# Altium footprint library Connectors.PcbLib: 228 footprints (part 6 of 15)
Each footprint in its own frame and in the unit in brackets; x right, y up, seen from the top. Pads: shape width x height; smd on the part's side, far side on the other; paste and mask are expansions set on the pad; w line width, h text height; cw(c..) or ccw(c..) is an arc to the next point about the centre after c.
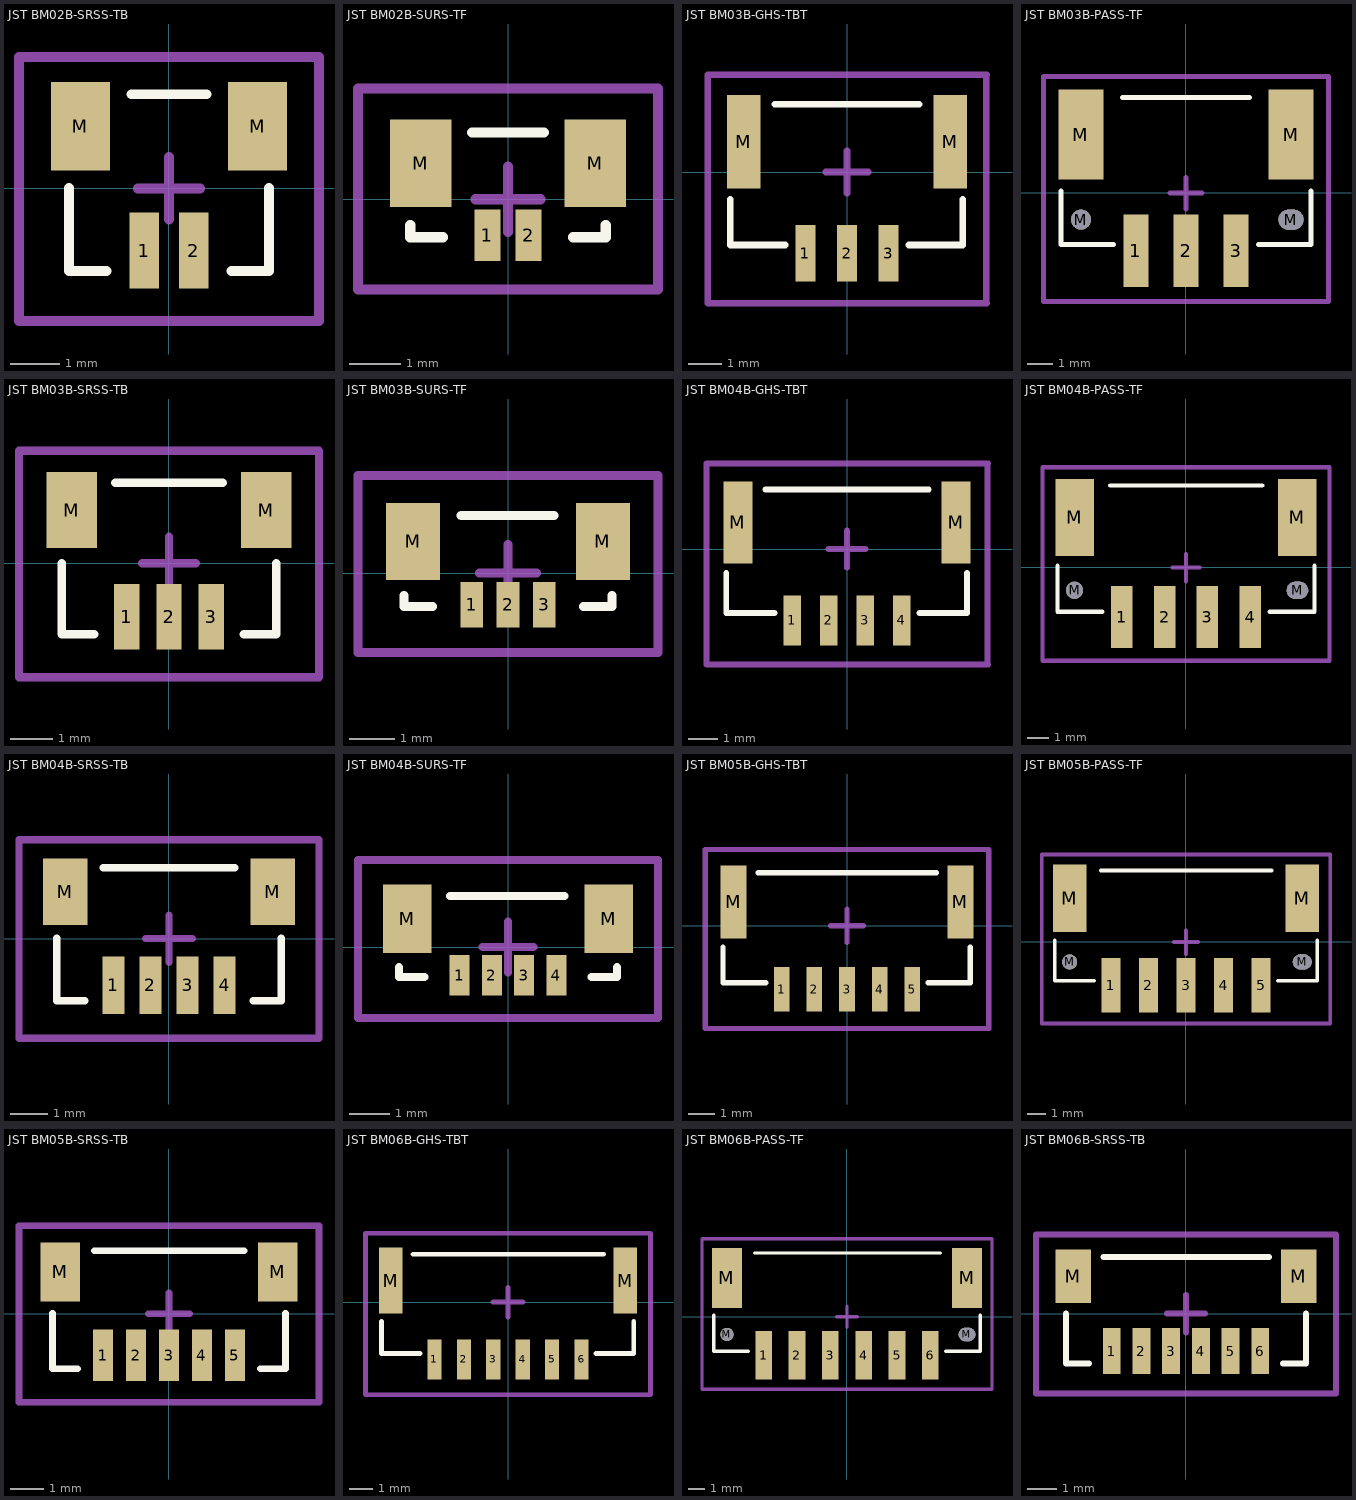
[diagram p5: the footprints below, top view; thin cyan lines are the x and y axes]

## JST BM02B-SRSS-TB [mm] "1.0mm pitch/Disconnectable Crimp style connector"
height 2.95
pads (4):
  rect 0.6x1.55 smd: 1(-0.5,-1.262) 2(0.5,-1.262)
  rect 1.2x1.8 smd: M(-1.8,1.262) M(1.8,1.262)
Top Overlay:
  lines w0.2: -2.032,0.008 -2.032,-1.676 -1.27,-1.676 ; -0.762,1.913 0.762,1.913 ; 1.27,-1.676 2.032,-1.676 2.032,0.008
Top Courtyard:
  lines w0.2: -0.635,0 0.635,0 ; 0,-0.635 0,0.635 ; -3.048,-2.692 -3.048,2.667 3.048,2.667 3.048,-2.692 -3.048,-2.692
3D body "JST BM02B-SRSS-TB.STEP": height 4.32, standoff 0, extent -2,-1.687 2,1.913

## JST BM02B-SURS-TF [mm] "1.0mm pitch/Disconnectable Crimp style connector"
height 3.95
pads (4):
  rect 0.5x1 smd: 1(-0.4,-0.7) 2(0.4,-0.7)
  rect 1.2x1.7 smd: M(-1.7,0.7) M(1.7,0.7)
Top Overlay:
  lines w0.2: -1.905,-0.5 -1.905,-0.741 -1.27,-0.741 ; -0.7,1.3 0.7,1.3 ; 1.27,-0.741 1.905,-0.741 1.905,-0.5
Top Courtyard:
  lines w0.2: -0.635,0 0.635,0 ; 0,-0.635 0,0.635 ; -2.921,-1.757 -2.921,2.159 2.921,2.159 2.921,-1.757 -2.921,-1.757
3D body "JST BM02B-SURS-TF.STEP": height 2.75, standoff 0, extent -1.9,-0.995 1.9,1.255

## JST BM03B-GHS-TBT [mm] "JST GH Series 1.25mm pitch, 4 pin top entry connector"
height 4.5
pads (5):
  rect 0.6x1.7 smd: 1(-1.25,-2.437) 2(0,-2.437) 3(1.25,-2.437)
  rect 1x2.8 smd: M(-3.1,0.913) M(3.1,0.913)
Top Overlay:
  lines w0.2: -3.5,-0.812 -3.5,-2.187 -1.85,-2.187 ; -2.159,2.032 2.159,2.032 ; 1.85,-2.187 3.475,-2.187 3.475,-0.812
Top Courtyard:
  lines w0.2: -0.635,0 0.635,0 ; 0,-0.635 0,0.635 ; 4.181,-3.937 4.181,2.921 ; 4.191,-3.937 -4.181,-3.937 -4.181,2.921 4.191,2.921
3D body "JST BM03B-GHS-TBT.STEP": height 4.18, standoff -0.03, extent -3.5,-2.918 3.5,2.032

## JST BM03B-PASS-TF [mm] "JST PA Series 2mm pitch, top entry connector"
height 11.1
pads (7):
  rect 1x2.9 smd: 1(-2,-2.325) 2(0,-2.325) 3(2,-2.325)
  round 0.8 hole 0.8 unplated mask+0.102: M(-4.2,-1.075)
  rect 1.8x3.6 smd: M(-4.2,2.325) M(4.2,2.325)
  oval 1x0.8 hole 0.8 slot 1 at 0 deg unplated mask+0.102: M(4.2,-1.075)
Top Overlay:
  lines w0.2: -5,0.075 -5,-2.075 -2.905,-2.075 ; -2.54,3.81 2.54,3.81 ; 2.905,-2.075 5,-2.075 5,0.075
Top Courtyard:
  lines w0.2: -0.635,-0.015 0.635,-0.015 ; 0,-0.65 0,0.62 ; -5.699,-4.357 -5.699,4.66 5.699,4.66 5.699,-4.357 -5.699,-4.357
3D body "JST BM03B-PASS-TF.STEP": height 9, standoff 0, extent -5,-3.225 5,3.875

## JST BM03B-SRSS-TB [mm] "1.0mm pitch/Disconnectable Crimp style connector"
height 2.95
pads (5):
  rect 0.6x1.55 smd: 1(-1,-1.262) 2(0,-1.262) 3(1,-1.262)
  rect 1.2x1.8 smd: M(-2.3,1.262) M(2.3,1.262)
Top Overlay:
  lines w0.2: -2.532,0.008 -2.532,-1.676 -1.77,-1.676 ; -1.27,1.905 1.27,1.905 ; 1.77,-1.676 2.532,-1.676 2.532,0.008
Top Courtyard:
  lines w0.2: -0.635,0 0.635,0 ; 0,-0.635 0,0.635 ; -3.548,-2.692 3.548,-2.692 3.548,2.667 -3.548,2.667 -3.548,-2.692
3D body "JST BM03B-SRSS-TB.STEP": height 4.32, standoff 0, extent -2.5,-1.688 2.5,1.912

## JST BM03B-SURS-TF [mm] "1.0mm pitch/Disconnectable Crimp style connector"
height 3.95
pads (5):
  rect 0.5x1 smd: 1(-0.8,-0.7) 2(0,-0.7) 3(0.8,-0.7)
  rect 1.2x1.7 smd: M(-2.1,0.7) M(2.1,0.7)
Top Overlay:
  lines w0.2: -2.305,-0.5 -2.305,-0.741 -1.67,-0.741 ; -1.035,1.27 1.016,1.27 ; 1.67,-0.741 2.305,-0.741 2.305,-0.5
Top Courtyard:
  lines w0.2: -0.635,0 0.635,0 ; 0,-0.635 0,0.635 ; -3.321,-1.757 3.321,-1.757 3.321,2.159 -3.321,2.159 -3.321,-1.757
3D body "JST BM03B-SURS-TF.STEP": height 2.75, standoff 0, extent -2.3,-1.016 2.3,1.234

## JST BM04B-GHS-TBT [mm] "JST GH Series 1.25mm pitch, top entry connector"
height 4.5
pads (6):
  rect 0.6x1.7 smd: 1(-1.875,-2.437) 2(-0.625,-2.437) 3(0.625,-2.437) 4(1.875,-2.437)
  rect 1x2.8 smd: M(-3.725,0.913) M(3.725,0.913)
Top Overlay:
  lines w0.2: -4.125,-0.812 -4.125,-2.187 -2.475,-2.187 ; -2.784,2.032 2.794,2.032 ; 2.475,-2.187 4.1,-2.187 4.1,-0.812
Top Courtyard:
  lines w0.2: -0.635,0 0.635,0 ; 0,-0.635 0,0.635 ; 4.806,-3.937 4.806,2.921 ; 4.826,-3.937 -4.806,-3.937 -4.806,2.921 4.826,2.921
3D body "JST BM04B-GHS-TBT.STEP": height 4.18, standoff -0.03, extent -4.125,-2.918 4.125,2.032

## JST BM04B-PASS-TF [mm] "JST PA Series 2mm pitch, top entry connector"
height 11.1
pads (8):
  rect 1x2.9 smd: 1(-3,-2.325) 2(-1,-2.325) 3(1,-2.325) 4(3,-2.325)
  round 0.8 hole 0.8 unplated mask+0.102: M(-5.2,-1.075)
  rect 1.8x3.6 smd: M(-5.2,2.325) M(5.2,2.325)
  oval 1x0.8 hole 0.8 slot 1 at 0 deg unplated mask+0.102: M(5.2,-1.075)
Top Overlay:
  lines w0.2: -6,0.075 -6,-2.075 -3.905,-2.075 ; -3.54,3.81 3.556,3.81 ; 3.905,-2.075 6,-2.075 6,0.075
Top Courtyard:
  lines w0.2: -0.635,-0.015 0.635,-0.015 ; 0,-0.65 0,0.62 ; -6.699,-4.357 6.699,-4.357 6.699,4.66 -6.699,4.66 -6.699,-4.357
3D body "JST BM04B-PASS-TF.STEP": height 9, standoff 0, extent -6,-3.225 6,3.875

## JST BM04B-SRSS-TB [mm] "1.0mm pitch/Disconnectable Crimp style connector"
height 2.95
pads (6):
  rect 0.6x1.55 smd: 1(-1.5,-1.262) 2(-0.5,-1.262) 3(0.5,-1.262) 4(1.5,-1.262)
  rect 1.2x1.8 smd: M(-2.8,1.262) M(2.8,1.262)
Top Overlay:
  lines w0.2: -3.032,0.008 -3.032,-1.676 -2.27,-1.676 ; -1.77,1.905 1.778,1.905 ; 2.27,-1.676 3.032,-1.676 3.032,0.008
Top Courtyard:
  lines w0.2: -0.635,0 0.635,0 ; 0,-0.635 0,0.635 ; -4.048,-2.692 -4.048,2.667 4.048,2.667 4.048,-2.692 -4.048,-2.692
3D body "JST BM04B-SRSS-TB.STEP": height 4.32, standoff 0, extent -3,-1.688 3,1.912

## JST BM04B-SURS-TF [mm] "1.0mm pitch/Disconnectable Crimp style connector"
height 3.95
pads (6):
  rect 0.5x1 smd: 1(-1.2,-0.7) 2(-0.4,-0.7) 3(0.4,-0.7) 4(1.2,-0.7)
  rect 1.2x1.7 smd: M(-2.5,0.7) M(2.5,0.7)
Top Overlay:
  lines w0.2: -2.705,-0.5 -2.705,-0.741 -2.07,-0.741 ; -1.435,1.27 1.397,1.27 ; 2.07,-0.741 2.705,-0.741 2.705,-0.5
Top Courtyard:
  lines w0.2: -0.635,0 0.635,0 ; 0,-0.635 0,0.635 ; -3.721,-1.757 3.721,-1.757 3.721,2.159 -3.721,2.159 -3.721,-1.757
3D body "JST BM04B-SURS-TF.STEP": height 2.75, standoff 0, extent -2.7,-1.016 2.7,1.234

## JST BM05B-GHS-TBT [mm] "JST GH Series 1.25mm pitch, top entry connector"
height 4.5
pads (7):
  rect 0.6x1.7 smd: 1(-2.5,-2.437) 2(-1.25,-2.437) 3(0,-2.437) 4(1.25,-2.437) 5(2.5,-2.437)
  rect 1x2.8 smd: M(-4.35,0.913) M(4.35,0.913)
Top Overlay:
  lines w0.2: -4.75,-0.812 -4.75,-2.187 -3.1,-2.187 ; -3.409,2.032 3.429,2.032 ; 3.1,-2.187 4.725,-2.187 4.725,-0.812
Top Courtyard:
  lines w0.2: -0.635,0 0.635,0 ; 0,-0.635 0,0.635 ; -5.431,-3.937 -5.431,2.921 5.431,2.921 5.431,-3.937 -5.431,-3.937
3D body "JST BM05B-GHS-TBT.STEP": height 4.18, standoff -0.03, extent -4.75,-2.918 4.75,2.032

## JST BM05B-PASS-TF [mm] "JST PA Series 2mm pitch, top entry connector"
height 11.1
pads (9):
  rect 1x2.9 smd: 1(-4,-2.325) 2(-2,-2.325) 3(0,-2.325) 4(2,-2.325) 5(4,-2.325)
  round 0.8 hole 0.8 unplated mask+0.102: M(-6.2,-1.075)
  rect 1.8x3.6 smd: M(-6.2,2.325) M(6.2,2.325)
  oval 1x0.8 hole 0.8 slot 1 at 0 deg unplated mask+0.102: M(6.2,-1.075)
Top Overlay:
  lines w0.2: -7,0.075 -7,-2.075 -4.905,-2.075 ; -4.54,3.81 4.572,3.81 ; 4.905,-2.075 7,-2.075 7,0.075
Top Courtyard:
  lines w0.2: -0.635,-0.015 0.635,-0.015 ; 0,-0.65 0,0.62 ; -7.699,-4.357 -7.699,4.66 7.699,4.66 7.699,-4.357 -7.699,-4.357
3D body "JST BM05B-PASS-TF.STEP": height 9, standoff 0, extent -7,-3.225 7,3.875

## JST BM05B-SRSS-TB [mm] "1.0mm pitch/Disconnectable Crimp style connector"
height 2.95
pads (7):
  rect 0.6x1.55 smd: 1(-2,-1.262) 2(-1,-1.262) 3(0,-1.262) 4(1,-1.262) 5(2,-1.262)
  rect 1.2x1.8 smd: M(-3.3,1.262) M(3.3,1.262)
Top Overlay:
  lines w0.2: -3.532,0.008 -3.532,-1.676 -2.77,-1.676 ; -2.27,1.905 2.286,1.905 ; 2.77,-1.676 3.532,-1.676 3.532,0.008
Top Courtyard:
  lines w0.2: -0.635,0 0.635,0 ; 0,-0.635 0,0.635 ; -4.548,-2.692 -4.548,2.667 4.548,2.667 4.548,-2.692 -4.548,-2.692
3D body "JST BM05B-SRSS-TB.STEP": height 4.32, standoff 0, extent -3.5,-1.688 3.5,1.912

## JST BM06B-GHS-TBT [mm] "JST GH Series 1.25mm pitch, top entry connector"
height 4.5
pads (8):
  rect 0.6x1.7 smd: 1(-3.125,-2.437) 2(-1.875,-2.437) 3(-0.625,-2.437) 4(0.625,-2.437) 5(1.875,-2.437) 6(3.125,-2.437)
  rect 1x2.8 smd: M(-4.975,0.913) M(4.975,0.913)
Top Overlay:
  lines w0.2: -5.375,-0.812 -5.375,-2.187 -3.725,-2.187 ; -4.034,2.032 4.064,2.032 ; 3.725,-2.187 5.35,-2.187 5.35,-0.812
Top Courtyard:
  lines w0.2: -0.635,0 0.635,0 ; 0,-0.635 0,0.635 ; -6.056,-3.937 6.056,-3.937 6.056,2.921 -6.056,2.921 -6.056,-3.937
3D body "JST BM06B-GHS-TBT.STEP": height 4.18, standoff -0.03, extent -5.375,-2.918 5.375,2.032

## JST BM06B-PASS-TF [mm] "JST PA Series 2mm pitch, top entry connector"
height 11.1
pads (10):
  rect 1x2.9 smd: 1(-5,-2.325) 2(-3,-2.325) 3(-1,-2.325) 4(1,-2.325) 5(3,-2.325) 6(5,-2.325)
  round 0.8 hole 0.8 unplated mask+0.102: M(-7.2,-1.075)
  rect 1.8x3.6 smd: M(-7.2,2.325) M(7.2,2.325)
  oval 1x0.8 hole 0.8 slot 1 at 0 deg unplated mask+0.102: M(7.2,-1.075)
Top Overlay:
  lines w0.2: -8,0.075 -8,-2.075 -5.905,-2.075 ; -5.54,3.81 5.588,3.81 ; 5.905,-2.075 8,-2.075 8,0.075
Top Courtyard:
  lines w0.2: -0.635,-0.015 0.635,-0.015 ; 0,-0.65 0,0.62 ; -8.699,-4.357 8.699,-4.357 8.699,4.66 -8.699,4.66 -8.699,-4.357
3D body "JST BM06B-PASS-TF.STEP": height 9, standoff 0, extent -8,-3.225 8,3.875

## JST BM06B-SRSS-TB [mm] "1.0mm pitch/Disconnectable Crimp style connector"
height 2.95
pads (8):
  rect 0.6x1.55 smd: 1(-2.5,-1.262) 2(-1.5,-1.262) 3(-0.5,-1.262) 4(0.5,-1.262) 5(1.5,-1.262) 6(2.5,-1.262)
  rect 1.2x1.8 smd: M(-3.8,1.262) M(3.8,1.262)
Top Overlay:
  lines w0.2: -4.032,0.008 -4.032,-1.676 -3.27,-1.676 ; -2.77,1.905 2.794,1.905 ; 3.27,-1.676 4.032,-1.676 4.032,0.008
Top Courtyard:
  lines w0.2: -0.635,0 0.635,0 ; 0,-0.635 0,0.635 ; -5.048,-2.692 5.048,-2.692 5.048,2.667 -5.048,2.667 -5.048,-2.692
3D body "JST BM06B-SRSS-TB.STEP": height 4.32, standoff 0, extent -4,-1.688 4,1.912